# Altium schematic symbol library SnapEDAsch.SchLib: 1 symbol
Pins are listed as number, name and electrical type; pins without a type are passive.

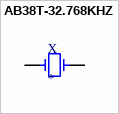
[diagram p0: symbol AB38T-32.768KHZ]

## AB38T-32.768KHZ
designator X
32.768kHz Â±20ppm Crystal 12.5pF 30 kOhms Cylindrical Can, Radial; MP: AB38T-32.768KHZ; MF: Abracon; Price: None; Package: Cylindrical Can Radial  Abracon; Value: *; Availability: Unavailable; SnapEDA_Link: https://www.snapeda.com/parts/AB38T-32.768KHZ/Abracon%20LLC/view-part/319378/?ref=snap
footprint XTAL_AB38T-32.768KHZ
pins: 1, 2